# Altium integrated library ECS-.327-12.5-17-TR.IntLib: 1 symbol
Pins are listed as number, name and electrical type; pins without a type are passive.

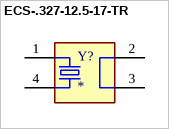
[diagram p0: symbol ECS-.327-12.5-17-TR]

## ECS-.327-12.5-17-TR
designator Y?
MP: ECS-.327-12.5-17-TR; Package: None; Price: None; Value: *; Availability: Unavailable
footprint XTAL_ECS-.327-12.5-17-TR
pins: 1, 2, 3, 4